# Altium footprint library Crystal_Osilator$.PcbLib: 54 footprints (part 4 of 4)
Each footprint in its own frame and in the unit in brackets; x right, y up, seen from the top. Pads: shape width x height; smd on the part's side, far side on the other; paste and mask are expansions set on the pad; w line width, h text height; cw(c..) or ccw(c..) is an arc to the next point about the centre after c.
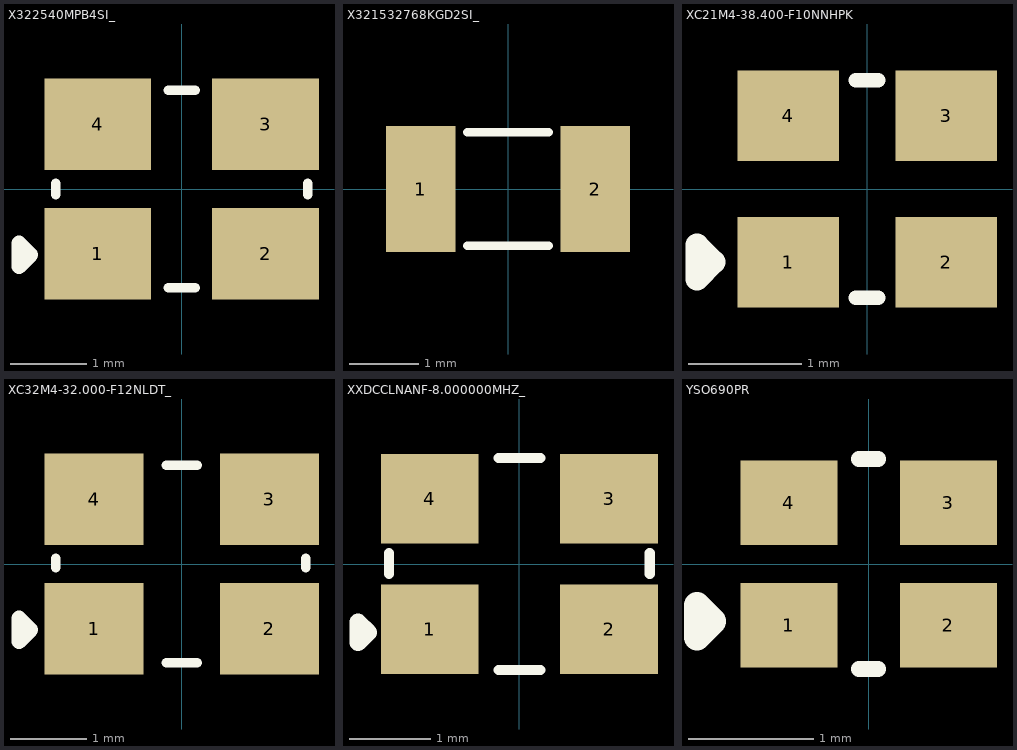
[diagram p3: the footprints below, top view; thin cyan lines are the x and y axes]

## X322540MPB4SI_ [mm]
pads (4):
  rect 1.4x1.2 smd: 1(-1.1,-0.85) 2(1.1,-0.85) 3(1.1,0.85) 4(-1.1,0.85)
Top Overlay:
  lines w0.127: -1.651,-0.076 -1.651,0.076 ; -0.178,-1.295 0.178,-1.295 ; -0.178,1.295 0.178,1.295 ; 1.651,-0.076 1.651,0.076
  lines w0.2: -2.134,-1.016 -1.981,-0.864 -2.134,-0.711 -2.134,-1.016
3D body "ABM8-24.000MHZ-R60-D-1-W-T.STEP": height 0.8, standoff 0, extent -1.6,-1.25 1.6,1.25

## X321532768KGD2SI_ [mm]
pads (2):
  rect 1x1.8 smd: 1(-1.25,0) 2(1.25,0)
Top Overlay:
  lines w0.127: -0.584,-0.813 0.584,-0.813 ; -0.584,0.813 0.584,0.813
3D body "User Library-FX135A-327.step": height 0.9, standoff -0.01, extent -1.6,-0.75 1.6,0.75

## XC21M4-38.400-F10NNHPK [mm]
pads (4):
  rect 0.9x0.8 smd: 1(-0.7,-0.65) 2(0.7,-0.65) 3(0.7,0.65) 4(-0.7,0.65)
Top Overlay:
  lines w0.127: -0.102,-0.965 0.098,-0.965 ; -0.102,0.965 0.098,0.965
  lines w0.2: -1.509,-0.8 -1.357,-0.647 -1.509,-0.495 -1.509,-0.8

## XC32M4-32.000-F12NLDT_ [mm]
pads (4):
  rect 1.3x1.2 smd: 1(-1.15,-0.85) 2(1.15,-0.85) 3(1.15,0.85) 4(-1.15,0.85)
Top Overlay:
  lines w0.127: -1.65,-0.051 -1.65,0.076 ; -0.202,-1.295 0.204,-1.295 ; -0.202,1.295 0.204,1.295 ; 1.626,-0.051 1.626,0.076
  lines w0.2: -2.134,-1.016 -1.981,-0.864 -2.134,-0.711 -2.134,-1.016
3D body "User Library-Crystal_ECX-32.STEP": height 0.82, standoff 0, extent -1.6,-1.25 1.6,1.25

## XXDCCLNANF-8.000000MHZ_ [mm]
pads (4):
  rect 1.2x1.1 smd: 1(-1.1,-0.8) 2(1.1,-0.8) 3(1.1,0.8) 4(-1.1,0.8)
Top Overlay:
  lines w0.127: -1.6,-0.122 -1.6,0.132 ; -0.254,-1.3 0,-1.3 0.254,-1.3 ; -0.254,1.3 0,1.3 0.254,1.3 ; 1.6,-0.122 1.6,0.132
  lines w0.21: -1.981,-0.965 -1.981,-0.711 -1.854,-0.838 -1.981,-0.965
3D body "User Library-XTAL-3_2x2_5.step": height 0.91, standoff -0.01, extent -1.6,-1.25 1.6,1.25

## YSO690PR [mm]
pads (4):
  rect 0.775x0.675 smd: 1(-0.637,-0.487) 2(0.637,-0.487) 3(0.637,0.487) 4(-0.637,0.487)
Top Overlay:
  lines w0.127: -0.076,-0.838 0.076,-0.838 ; -0.076,0.838 0.076,0.838
  lines w0.21: -1.372,-0.584 -1.372,-0.33 -1.245,-0.457 -1.372,-0.584
3D body "C1986227.step": height 0.47, standoff 0, extent -1,-0.8 1,0.8